# Altium schematic symbol library DSL70E6327HTSA1.SchLib: 1 symbol
Pins are listed as number, name and electrical type; pins without a type are passive.

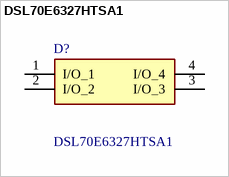
[diagram p0: symbol DSL70E6327HTSA1]

## DSL70E6327HTSA1
designator D?
ESD Suppressors / TVS Diodes ESD/EMI PROTECTION WIRELINE 15kV 50V; Manufacturer_Name: Infineon; Geometry.Height: 1.1mm; Mouser Part Number: 726-DSL70E6327HTSA1; Mouser Price/Stock: https://www.mouser.co.uk/ProductDetail/Infineon-Technologies/DSL70E6327HTSA1?qs=K00xGehIljvhVLVgAZqOZg%3D%3D; Manufacturer_Part_Number: DSL70E6327HTSA1; Datasheet Link: https://www.infineon.com/dgdl/Infineon-DSL70-DS-v01_01-en.pdf?fileId=db3a30431441fb5d0114927e397f1007
footprint DSL70E6327HTSA1
pins: 1 I/O_1, 2 I/O_2, 3 I/O_3, 4 I/O_4